# Altium footprint library CBJ70.PcbLib: 1 footprints
Each footprint in its own frame and in the unit in brackets; x right, y up, seen from the top. Pads: shape width x height; smd on the part's side, far side on the other; paste and mask are expansions set on the pad; w line width, h text height; cw(c..) or ccw(c..) is an arc to the next point about the centre after c.
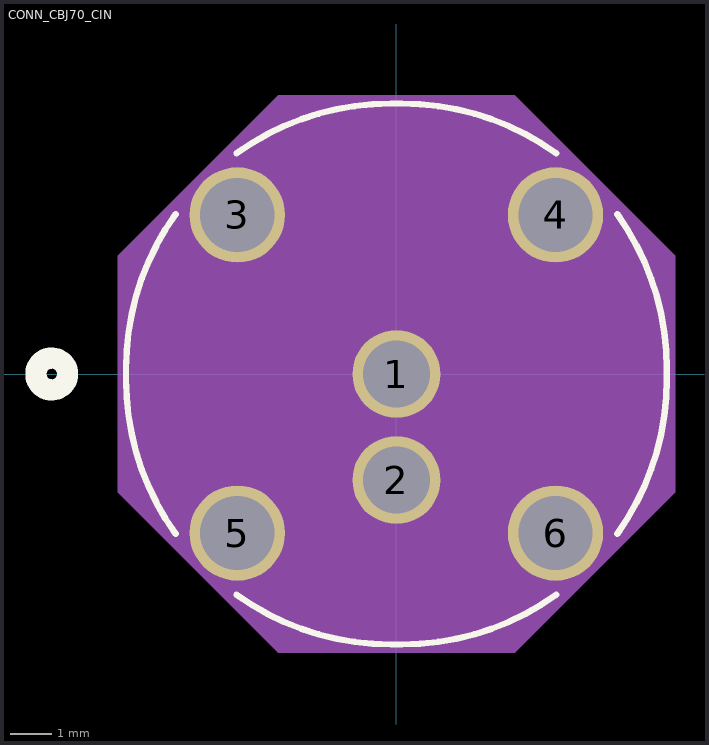
[diagram p0: the footprint, top view; thin cyan lines are the x and y axes]

## CONN_CBJ70_CIN [mil]
pads (6):
  round 83 / inner round 60 / far side round 83 hole 63 paste-99999 mask+0: 1(0,0) 2(0,-100)
  round 90 / inner round 60 / far side round 90 hole 70 paste-99999 mask-45: 3(-150,150) 4(150,150) 5(-150,-150) 6(150,-150)
Top Overlay:
  circle w20: c-325,0 r15
  lines w6: -208.09,-150.78 cw(c-5,-5) -255,-5 -255,5 cw(c-5,5) -208.09,150.78 ; -150.78,-208.09 ccw(c-5,-5) -5,-255 5,-255 ccw(c5,-5) 150.78,-208.09 ; -150.78,208.09 cw(c-5,5) -5,255 5,255 cw(c5,5) 150.78,208.09 ; 208.09,-150.78 ccw(c5,-5) 255,-5 255,5 ccw(c5,5) 208.09,150.78
Bottom Overlay:
  circle w20: c-325,0 r15
Mechanical 13:
  circle w20: c0,75 r15
  lines w0: -250,0 cw(c0,0) 0,250 cw(c0,0) 250,0 cw(c0,0) 0,-250 cw(c0,0) -250,0
Mechanical 15:
  region: 260,-110.52 260,110.52 110.52,260 -110.52,260 -260,110.52 -260,-110.52 -110.52,-260 110.52,-260
  lines w6: -260,-110.52 -260,110.52 -110.52,260 110.52,260 260,110.52 260,-110.52 110.52,-260 -110.52,-260 -260,-110.52
3D body "CBJ70.step": height 831, standoff -177, extent -250,-250 250,250